# EAGLE library part PICO-ZERO (library pixel)
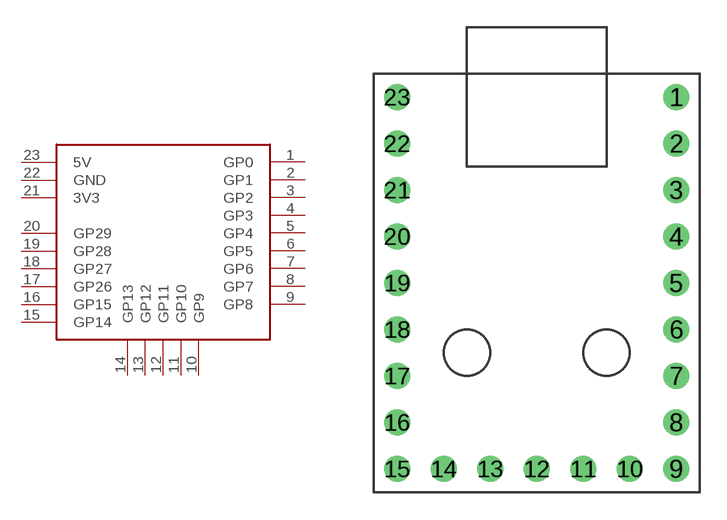
[diagram p45: symbol with the pads of PICO-ZERO; footprint PICO-ZERO]

Designator prefix -

## PICO-ZERO  [PICO-ZERO]
1  GP0
2  GP1
3  GP2
4  GP3
5  GP4
6  GP5
7  GP6
8  GP7
9  GP8
10  GP9
11  GP10
12  GP11
13  GP12
14  GP13
15  GP14
16  GP15
17  GP26
18  GP27
19  GP28
20  GP29
21  3V3
22  GND
23  5V

## Footprint PICO-ZERO (pad centres in mm)
drill 0.9 pad 1.27: 1 7.62,10.16; 2 7.62,7.62; 3 7.62,5.08; 4 7.62,2.54; 5 7.62,0; 6 7.62,-2.54; 7 7.62,-5.08; 8 7.62,-7.62; 9 7.62,-10.16; 10 5.08,-10.16; 11 2.54,-10.16; 12 0,-10.16; 13 -2.54,-10.16; 14 -5.08,-10.16; 15 -7.62,-10.16; 16 -7.62,-7.62; 17 -7.62,-5.08; 18 -7.62,-2.54; 19 -7.62,0; 20 -7.62,2.54; 21 -7.62,5.08; 22 -7.62,7.62; 23 -7.62,10.16